# Altium footprint library 74LVC14AD.PcbLib: 3 footprints
Each footprint in its own frame and in the unit in brackets; x right, y up, seen from the top. Pads: shape width x height; smd on the part's side, far side on the other; paste and mask are expansions set on the pad; w line width, h text height; cw(c..) or ccw(c..) is an arc to the next point about the centre after c.
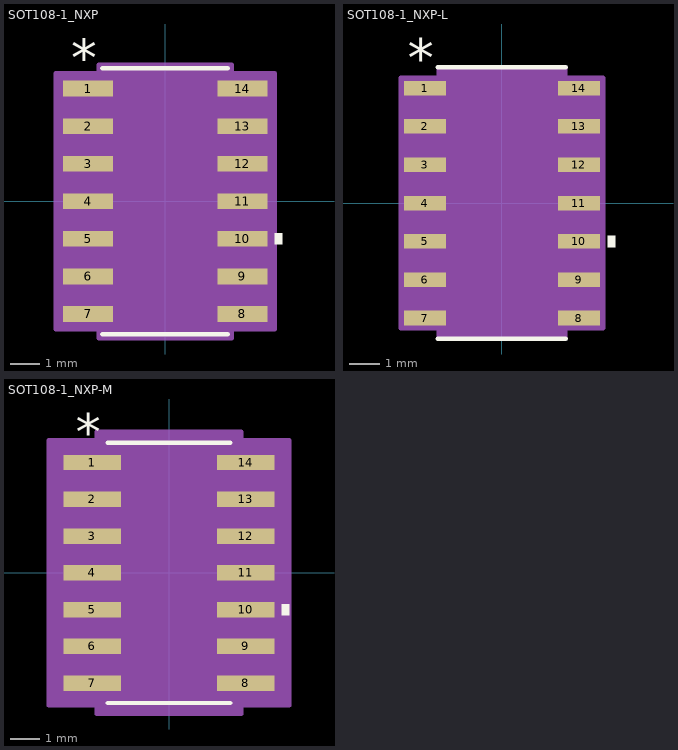
[diagram p0: the footprints below, top view; thin cyan lines are the x and y axes]

## SOT108-1_NXP [mil]
pads (14):
  rect 66.56x20.97 smd paste+0 mask+0: 1(-102.5,150) 2(-102.5,100) 3(-102.5,50) 4(-102.5,0) 5(-102.5,-50) 6(-102.5,-100) 7(-102.5,-150) 8(102.5,-150) 9(102.5,-100) 10(102.5,-50) 11(102.5,0) 12(102.5,50) 13(102.5,100) 14(102.5,150)
Top Overlay:
  region: 145.78,-42.5 155.78,-42.5 155.78,-57.5 145.78,-57.5
  lines w6: -83.5,-177 83.5,-177 ; -83.5,177 83.5,177
  text ".Designator" at -137.5,-25 h50
  text "*" at -125,165.97 h50
Mechanical 13:
  lines w1: -12,172 ccw(c0,172) 12,172 ; -122,-159.5 -122,-140.5 -78.5,-140.5 -78.5,-159.5 -122,-159.5 ; -122,-109.5 -122,-90.5 -78.5,-90.5 -78.5,-109.5 -122,-109.5 ; -122,-59.5 -122,-40.5 -78.5,-40.5 -78.5,-59.5 -122,-59.5 ; -122,-9.5 -122,9.5 -78.5,9.5 -78.5,-9.5 -122,-9.5 ; -122,40.5 -122,59.5 -78.5,59.5 -78.5,40.5 -122,40.5 ; -122,90.5 -122,109.5 -78.5,109.5 -78.5,90.5 -122,90.5 ; -122,140.5 -122,159.5 -78.5,159.5 -78.5,140.5 -122,140.5 ; -78.5,-172 78.5,-172 78.5,172 -78.5,172 -78.5,-172 ; 78.5,-159.5 78.5,-140.5 122,-140.5 122,-159.5 78.5,-159.5 ; 78.5,-109.5 78.5,-90.5 122,-90.5 122,-109.5 78.5,-109.5 ; 78.5,-59.5 78.5,-40.5 122,-40.5 122,-59.5 78.5,-59.5 ; 78.5,-9.5 78.5,9.5 122,9.5 122,-9.5 78.5,-9.5 ; 78.5,40.5 78.5,59.5 122,59.5 122,40.5 78.5,40.5 ; 78.5,90.5 78.5,109.5 122,109.5 122,90.5 78.5,90.5 ; 78.5,140.5 78.5,159.5 122,159.5 122,140.5 78.5,140.5
  text "*" at -76,119 h50
  text ".Designator" at -137.5,-25 h50
Mechanical 15:
  region: -88.5,-170.48 -145.78,-170.48 -145.78,170.48 -88.5,170.48 -88.5,182 88.5,182 88.5,170.48 145.78,170.48 145.78,-170.48 88.5,-170.48 88.5,-182 -88.5,-182
  lines w6: -145.78,-170.48 -145.78,170.48 -88.5,170.48 -88.5,182 88.5,182 88.5,170.48 145.78,170.48 145.78,-170.48 88.5,-170.48 88.5,-182 -88.5,-182 -88.5,-170.48 -145.78,-170.48
3D body "SOT108-1_NXP.step": height 69.09, standoff 0, extent -122.01,-172.01 122.01,172.01

## SOT108-1_NXP-L [mil]
pads (14):
  rect 54.75x19 smd paste+0 mask+0: 1(-100.53,150) 2(-100.53,100) 3(-100.53,50) 4(-100.53,0) 5(-100.53,-50) 6(-100.53,-100) 7(-100.53,-150) 8(100.53,-150) 9(100.53,-100) 10(100.53,-50) 11(100.53,0) 12(100.53,50) 13(100.53,100) 14(100.53,150)
Top Overlay:
  region: 137.91,-42.5 147.91,-42.5 147.91,-57.5 137.91,-57.5
  lines w6: -83.5,-177 83.5,-177 ; -83.5,177 83.5,177
  text ".Designator" at -137.5,-25 h50
  text "*" at -123.03,164 h50
Mechanical 13:
  lines w1: -12,172 ccw(c0,172) 12,172 ; -122,-159.5 -122,-140.5 -78.5,-140.5 -78.5,-159.5 -122,-159.5 ; -122,-109.5 -122,-90.5 -78.5,-90.5 -78.5,-109.5 -122,-109.5 ; -122,-59.5 -122,-40.5 -78.5,-40.5 -78.5,-59.5 -122,-59.5 ; -122,-9.5 -122,9.5 -78.5,9.5 -78.5,-9.5 -122,-9.5 ; -122,40.5 -122,59.5 -78.5,59.5 -78.5,40.5 -122,40.5 ; -122,90.5 -122,109.5 -78.5,109.5 -78.5,90.5 -122,90.5 ; -122,140.5 -122,159.5 -78.5,159.5 -78.5,140.5 -122,140.5 ; -78.5,-172 78.5,-172 78.5,172 -78.5,172 -78.5,-172 ; 78.5,-159.5 78.5,-140.5 122,-140.5 122,-159.5 78.5,-159.5 ; 78.5,-109.5 78.5,-90.5 122,-90.5 122,-109.5 78.5,-109.5 ; 78.5,-59.5 78.5,-40.5 122,-40.5 122,-59.5 78.5,-59.5 ; 78.5,-9.5 78.5,9.5 122,9.5 122,-9.5 78.5,-9.5 ; 78.5,40.5 78.5,59.5 122,59.5 122,40.5 78.5,40.5 ; 78.5,90.5 78.5,109.5 122,109.5 122,90.5 78.5,90.5 ; 78.5,140.5 78.5,159.5 122,159.5 122,140.5 78.5,140.5
  text "*" at -76,119 h50
  text ".Designator" at -137.5,-25 h50
Mechanical 15:
  region: -82.5,-163.5 -131.91,-163.5 -131.91,163.5 -82.5,163.5 -82.5,176 82.5,176 82.5,163.5 131.91,163.5 131.91,-163.5 82.5,-163.5 82.5,-176 -82.5,-176
  lines w6: -131.91,-163.5 -131.91,163.5 -82.5,163.5 -82.5,176 82.5,176 82.5,163.5 131.91,163.5 131.91,-163.5 82.5,-163.5 82.5,-176 -82.5,-176 -82.5,-163.5 -131.91,-163.5
3D body "SOT108-1_NXP.step": height 69.09, standoff 0, extent -122.01,-172.01 122.01,172.01

## SOT108-1_NXP-M [mil]
pads (14):
  rect 78.37x20.97 smd paste+0 mask+0: 1(-104.47,150) 2(-104.47,100) 3(-104.47,50) 4(-104.47,0) 5(-104.47,-50) 6(-104.47,-100) 7(-104.47,-150) 8(104.47,-150) 9(104.47,-100) 10(104.47,-50) 11(104.47,0) 12(104.47,50) 13(104.47,100) 14(104.47,150)
Top Overlay:
  region: 153.65,-42.5 163.65,-42.5 163.65,-57.5 153.65,-57.5
  lines w6: -83.5,-177 83.5,-177 ; -83.5,177 83.5,177
  text ".Designator" at -137.5,-25 h50
  text "*" at -126.97,165.97 h50
Mechanical 13:
  lines w1: -12,172 ccw(c0,172) 12,172 ; -122,-159.5 -122,-140.5 -78.5,-140.5 -78.5,-159.5 -122,-159.5 ; -122,-109.5 -122,-90.5 -78.5,-90.5 -78.5,-109.5 -122,-109.5 ; -122,-59.5 -122,-40.5 -78.5,-40.5 -78.5,-59.5 -122,-59.5 ; -122,-9.5 -122,9.5 -78.5,9.5 -78.5,-9.5 -122,-9.5 ; -122,40.5 -122,59.5 -78.5,59.5 -78.5,40.5 -122,40.5 ; -122,90.5 -122,109.5 -78.5,109.5 -78.5,90.5 -122,90.5 ; -122,140.5 -122,159.5 -78.5,159.5 -78.5,140.5 -122,140.5 ; -78.5,-172 78.5,-172 78.5,172 -78.5,172 -78.5,-172 ; 78.5,-159.5 78.5,-140.5 122,-140.5 122,-159.5 78.5,-159.5 ; 78.5,-109.5 78.5,-90.5 122,-90.5 122,-109.5 78.5,-109.5 ; 78.5,-59.5 78.5,-40.5 122,-40.5 122,-59.5 78.5,-59.5 ; 78.5,-9.5 78.5,9.5 122,9.5 122,-9.5 78.5,-9.5 ; 78.5,40.5 78.5,59.5 122,59.5 122,40.5 78.5,40.5 ; 78.5,90.5 78.5,109.5 122,109.5 122,90.5 78.5,90.5 ; 78.5,140.5 78.5,159.5 122,159.5 122,140.5 78.5,140.5
  text "*" at -76,119 h50
  text ".Designator" at -137.5,-25 h50
Mechanical 15:
  region: -98.5,-180.48 -163.65,-180.48 -163.65,180.48 -98.5,180.48 -98.5,192 98.5,192 98.5,180.48 163.65,180.48 163.65,-180.48 98.5,-180.48 98.5,-192 -98.5,-192
  lines w6: -163.65,-180.48 -163.65,180.48 -98.5,180.48 -98.5,192 98.5,192 98.5,180.48 163.65,180.48 163.65,-180.48 98.5,-180.48 98.5,-192 -98.5,-192 -98.5,-180.48 -163.65,-180.48
3D body "SOT108-1_NXP.step": height 69.09, standoff 0, extent -122.01,-172.01 122.01,172.01